# Altium footprint library WISEVISION_X087-2832TSWIG02-H14.PcbLib: 1 footprints
Each footprint in its own frame and in the unit in brackets; x right, y up, seen from the top. Pads: shape width x height; smd on the part's side, far side on the other; paste and mask are expansions set on the pad; w line width, h text height; cw(c..) or ccw(c..) is an arc to the next point about the centre after c.
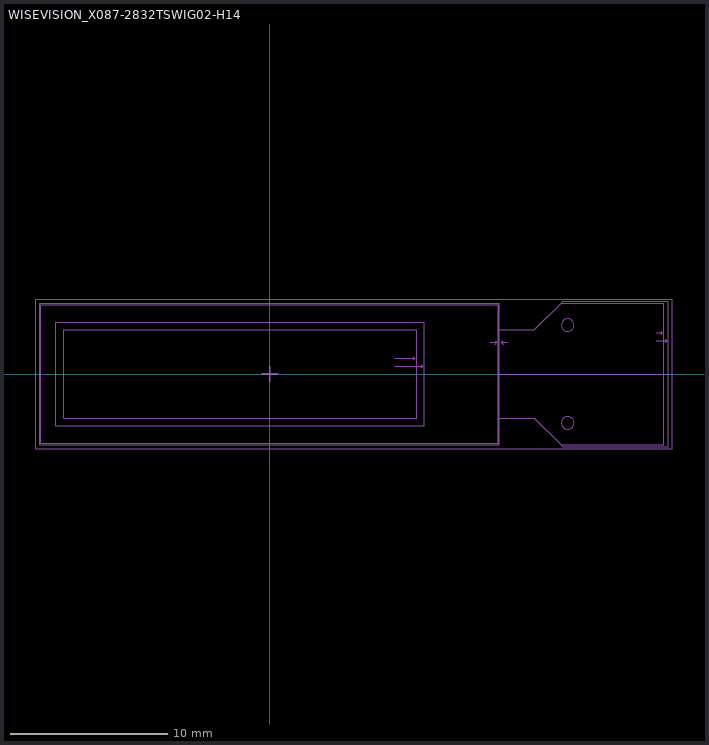
[diagram p0: the footprint, top view; thin cyan lines are the x and y axes]

## WISEVISION_X087-2832TSWIG02-H14 [mm]
height 1.27
Mechanical 13:
  circle w0.05: c18.9,-3.1 r0.4
  circle w0.05: c18.9,3.1 r0.4
  lines w0.05: 7.9,0.5 9.7,0.5 ; 7.9,1 9.2,1 ; 9.101,0.901 9.2,1 ; 9.101,1.099 9.2,1 ; 9.601,0.401 9.7,0.5 ; 9.601,0.599 9.7,0.5 ; 14,2 14.4,2 ; 14.301,1.901 14.4,2 ; 14.301,2.099 14.4,2 ; 14.575,-2.79 16.79,-2.79 18.5,-4.5 ; 14.575,0 25.275,0 ; 14.575,2.79 16.79,2.79 18.5,4.5 ; 14.799,1.901 14.7,2 ; 14.799,2.099 14.7,2 ; 15.1,2 14.7,2 ; 24.5,2.1 25.2,2.1 ; 24.5,2.6 24.9,2.6 ; 24.801,2.501 24.9,2.6 ; 24.801,2.699 24.9,2.6 ; 25.101,2.001 25.2,2.1 ; 25.101,2.199 25.2,2.1 ; 18.5,-4.5 ccw(c18.5,-4.5) 18.5,-4.5 ; 18.5,-4.5 18.6,-4.6 25.275,-4.6 25.275,4.6 18.6,4.6 18.5,4.5 ; 18.5,-4.5 25,-4.5 25,4.5 18.5,4.5 ; 18.5,4.5 ccw(c18.5,4.5) 18.5,4.5 ; -14.575,-4.475 14.575,-4.475 14.575,4.475 -14.575,4.475 -14.575,-4.475 ; -14.5,-4.4 -14.5,4.4 14.5,4.4 14.5,-4.4 -14.5,-4.4 ; -13.56,-3.29 -13.56,3.29 9.82,3.29 9.82,-3.29 -13.56,-3.29 ; -13.06,-2.79 9.32,-2.79 9.32,2.79 -13.06,2.79 -13.06,-2.79
  text "Max." at 15.293,1.85 h0.3
  text "Nom." at 12.914,1.85 h0.3
  text "A.A." at 7.04,0.85 h0.3
  text "V.A." at 7.056,0.35 h0.3
  text "Max." at 23.493,1.95 h0.3
  text "Nom." at 23.414,2.45 h0.3
Mechanical 15:
  lines w0.05: -14.825,-4.725 -14.825,4.725 25.525,4.725 25.525,-4.725 -14.825,-4.725
  lines w0.1: -0.5,0 0.5,0 ; 0,-0.5 0,0.5